# Altium schematic symbol library SmartDoorLock.SchLib: 4 symbols
Pins are listed as number, name and electrical type; pins without a type are passive.

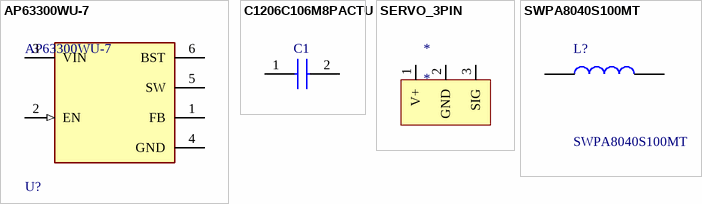
[diagram p0: symbols AP63300WU-7 to SWPA8040S100MT]

## AP63300WU-7
designator U?
DCDC CONV HV BUCK TSOT26 -40℃~+125℃ 1 22uA 3.8V~32V 3A 500kHz 800mV~31V Adjustable Buck Buck Built-in Yes TSOT-23-6 DC-DC Converters ROHS; Input Voltage Range: 3.8–32 V; Quiescent Current (IQ): 22 µA; ComponentLink1Description: Datasheet; ComponentLink1URL: https://jlc-prod-smt.oss-eu-central-1.aliyuncs.com/smtDataManualFile/8589835785613570048-C2158012.pdf?response-content-disposition=attachment%3B%20filename%3DC2158012.pdf%3B%20filename%2A%3DUTF-8%27%27C2158012.pdf&x-oss-date=20260828T182116Z&x-oss-expires=1800&x-oss-security-token=CAISgAN1q6Ft5B2yfSjIr5mDM86Hrupj1aq9WkTBkU0xTrZ%2F3fTj0Dz2IHhMdHJsAOodtv0%2FmmhT6PkclqRLcbhpcmfjV%2BZHzLB8qbVe1y0t557b16cNrbH4M4H6aXeirtuwDsz9SNTCALjPD3nPii50x5bjaDymRCbLGJaViJlhHLN1Ow6jdmhpCctxLAlvo9NgFxm3D%2Fu2NQPwiWf9FVdhvhEG6Vly8qOi2MaRmFy8yFTx0b0SvJ%2BjYMrmPctoN9JnSdC5mfdzau3a1TJ84gRD0a5wkaVA1zbDs5bfISEIuUzebreLqY03dV4mOvdqIcMe8qigz88fk%2FfIioH6xyxKOexoSCnFTOiiupCcQLPyao9jLu6iayqViY7QaIOTqQohZmkAMwVOasAsI3Ngh4zF97Qt0cVNkXO9gWfLI8DtuMleWkpq0PQZg6HD0eS19jklBdzSlusJRAJJUVBflCeKEaRNSAd3WGhEfM2%2BBt4QT30w5N2u00S8OSMIc1Ybn6KWD5sagAFFO4cEtv3qFzbnP2NKZSlVRiMMHPoXSZZT0ozSi9JbdkBzH%2Bw%2Fu5r9DBqh9xBBRElqUdvnGyTBTemoruL0oPqC%2FE8DPaigbgxMvrN8tcKDQZKZY9n1raC4YlXLAjnAY3rgpYyfOXRhSPs8koQzgKyuiiYaOrtvuNMVADF6FHdy2yAA&x-oss-signature-version=OSS4-HMAC-SHA256&x-oss-credential=STS.NZ6xt3C5BbhVXbpuMdB9S21H2%2F20260828%2Feu-central-1%2Foss%2Faliyun_v4_request&x-oss-signature=62ee175fe39943a71d4151ebaee6a729a965c7fa7734e7396a5103031b2d515f; Output Current: 3A; Switching Frequency: 500kHz; Package: TSOT26
footprint FP-TSOT26-IPC_C
footprint FP-TSOT26-IPC_B
footprint FP-TSOT26-IPC_A
footprint FP-TSOT26-MFG
pins: 1 FB, 2 EN (in), 3 VIN (power), 4 GND (power), 5 SW, 6 BST

## C1206C106M8PACTU
designator C1  (value not drawn)
Multilayer Ceramic Capacitors MLCC - SMD/SMT 10V 10uF X5R 1206 20%; Manufacturer_Name: Yageo Group; Datasheet Link: https://www.yageogroup.com/content/datasheet/asset/file/KEM_C1006_X5R_SMD; Manufacturer_Part_Number: C1206C106M8PACTU; Mouser Part Number: 80-C1206C106M8P; Mouser Price/Stock: https://www.mouser.co.uk/ProductDetail/KEMET/C1206C106M8PACTU?qs=guDyKOyRtV2o1krdb%252BJI4A%3D%3D; Arrow Part Number: C1206C106M8PACTU; Arrow Price/Stock: https://www.arrow.com/en/products/c1206c106m8pactu/kemet-corporation
footprint C1206
pins: 1, 2

## SERVO_3PIN
designator *
footprint SERVO
pins: 1 V+ (power), 2 GND (power), 3 SIG

## SWPA8040S100MT
designator L?
Power Inductors 10uH +/-20% 3.3A SMD,8.0x8.0x4.0mm RoHS; Manufacturer_Name: SUNLORD; Geometry.Height: 4.2mm; Manufacturer_Part_Number: SWPA8040S100MT; Mouser Part Number: *; Mouser Price/Stock: *; Arrow Part Number: *; Arrow Price/Stock: *; Datasheet Link: https://datasheet.lcsc.com/szlcsc/Sunlord-SWPA8040S100MT_C37429.pdf
footprint INDPM8080X420N
pins: 1, 2